# Altium schematic symbol library aqy412s.SchLib: 1 symbol
Pins are listed as number, name and electrical type; pins without a type are passive.

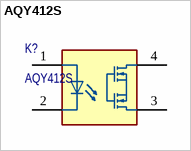
[diagram p0: symbol AQY412S]

## AQY412S
designator K?
RELAY OPTO 60V 0.5A SOP4 / Solid State Relay 50mA 1.5V DC-IN 0.5A 60V AC/DC-OUT 4-Pin SOP Tube; Manufacturer: Panasonic; Manufacturer Lifecycle Status: ACTIVE; Approvals: VDE, cULus; Contact Resistance: 1Ω; Current Rating: 500mA; Data Polarity: AC/DC; Forward Current: 5mA; Input Current: 900µA; Isolation Voltage: 1500Vrms; Number of Elements: 1; On-State Resistance: 2.5Ω; Value: 2.5Ω; Test Voltage: 1.5kV; Throw Configuration: SPST; Supplier: Farnell; Supplier Part Number: AQY412S; Manufacturer Part Number: AQY412S; RoHS: Compliant; Category: Solid State Relays; Stock: 46; Case/Package: SOP; Contact Plating: Tin Bismuth; Country of Origin: Japan; Export Control Classification Number (ECCN) Code: EAR99; Height: 2.1mm; Harmonized Tariff Schedule (HTS) Code: 8541.40.95.00; Introduction Date: 2005-10-06; Lead Free: Lead Free; Length: 4.4mm; Lifecycle Status: Production; Load Current: 500mA; Max Input Current: 50mA; Max Length: 4.4mm; Max Operating Temperature: 85°C; Max Output current: 500mA; Max Output Voltage: 60V; Min Operating Temperature: -40°C; Mounting Technology: Surface Mount; Pins: 4; Output Current: 500mA; Output Voltage: 60V; Packaging: Box; Radiation Hardening: No; REACH SVHC: Unaffected; Relay Type: Relay; Termination: Gull Wing; Width: 4.3mm; ComponentLink1URL: https://datasheet.octopart.com:443/AQY412S-Panasonic-datasheet-101746478.pdf?src-supplier=IHS; ComponentLink1Description: https://datasheet.octopart.com:443/AQY412S-Panasonic-datasheet-101746478.pdf?src-supplier=IHS; ComponentLink2URL: https://datasheet.octopart.com:443/AQY412S-Panasonic-datasheet-109899.pdf?src-supplier=Future+Electronics; ComponentLink2Description: https://datasheet.octopart.com:443/AQY412S-Panasonic-datasheet-109899.pdf?src-supplier=Future+Electronics; ComponentLink3URL: https://datasheet.octopart.com:443/AQY412S-Panasonic-datasheet-11045713.pdf?src-supplier=Future+Electronics; ComponentLink3Description: https://datasheet.octopart.com:443/AQY412S-Panasonic-datasheet-11045713.pdf?src-supplier=Future+Electronics; ComponentLink4URL: https://datasheet.octopart.com:443/AQY412S-Panasonic-datasheet-31679424.pdf?src-supplier=Electro+Sonic; ComponentLink4Description: https://datasheet.octopart.com:443/AQY412S-Panasonic-datasheet-31679424.pdf?src-supplier=Electro+Sonic; ComponentLink5URL: https://datasheet.octopart.com:443/AQY412S-Panasonic-datasheet-26528092.pdf?src-supplier=Electro+Sonic; ComponentLink5Description: https://datasheet.octopart.com:443/AQY412S-Panasonic-datasheet-26528092.pdf?src-supplier=Electro+Sonic; ComponentLink6URL: https://datasheet.octopart.com:443/AQY412S-Panasonic-datasheet-8857770.pdf?src-supplier=element14; ComponentLink6Description: https://datasheet.octopart.com:443/AQY412S-Panasonic-datasheet-8857770.pdf?src-supplier=element14; ComponentLink7URL: https://datasheet.octopart.com:443/AQY412S-Panasonic-datasheet-12514924.pdf?src-supplier=element14; ComponentLink7Description: https://datasheet.octopart.com:443/AQY412S-Panasonic-datasheet-12514924.pdf?src-supplier=element14; ComponentLink8URL: https://datasheet.octopart.com:443/AQY412S-Panasonic-datasheet-57363625.pdf?src-supplier=element14+APAC; ComponentLink8Description: https://datasheet.octopart.com:443/AQY412S-Panasonic-datasheet-57363625.pdf?src-supplier=element14+APAC; ComponentLink9URL: https://datasheet.octopart.com:443/AQY412S-Panasonic-datasheet-142674666.pdf?src-supplier=Master+Electronics; ComponentLink9Description: https://datasheet.octopart.com:443/AQY412S-Panasonic-datasheet-142674666.pdf?src-supplier=Master+Electronics; ComponentLink10URL: https://datasheet.octopart.com:443/AQY412S-Panasonic-datasheet-9700424.pdf?src-supplier=RS+(Formerly+Allied+Electronics); ComponentLink10Description: https://datasheet.octopart.com:443/AQY412S-Panasonic-datasheet-9700424.pdf?src-supplier=RS+(Formerly+Allied+Electronics); ComponentLink11URL: https://datasheet.octopart.com:443/AQY412S-Panasonic-datasheet-14176184.pdf?src-supplier=iiiC; ComponentLink11Description: https://datasheet.octopart.com:443/AQY412S-Panasonic-datasheet-14176184.pdf?src-supplier=iiiC
footprint sop-4
pins: 1 Anode, 2 Cathode, 3 Drain, 4 Drain